# Altium schematic symbol library LDL112PV33R.SchLib: 1 symbol
Pins are listed as number, name and electrical type; pins without a type are passive.

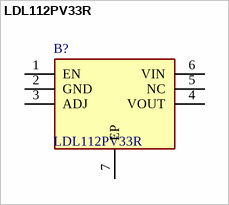
[diagram p0: symbol LDL112PV33R]

## LDL112PV33R
designator B?
LDO Voltage Regulators 1.2 A low quiescent current LDO with reverse current protection; Manufacturer_Name: STMicroelectronics; Geometry.Height: 1mm; Manufacturer_Part_Number: LDL112PV33R; Mouser Part Number: 511-LDL112PV33R; Mouser Price/Stock: https://www.mouser.co.uk/ProductDetail/STMicroelectronics/LDL112PV33R?qs=ClYTdQWm4hBLK%252B6rgDdn2Q%3D%3D; Arrow Part Number: LDL112PV33R; Arrow Price/Stock: https://www.arrow.com/en/products/ldl112pv33r/stmicroelectronics?utm_currency=USD&region=nac; Datasheet Link: https://www.st.com/resource/en/datasheet/ldl112.pdf
footprint SON95P300X300X100-7N-D
pins: 1 EN, 2 GND, 3 ADJ, 4 VOUT, 5 NC, 6 VIN, 7 EP